# Altium schematic symbol library AnalogProject_Schm.SchLib: 8 symbols
Pins are listed as number, name and electrical type; pins without a type are passive.

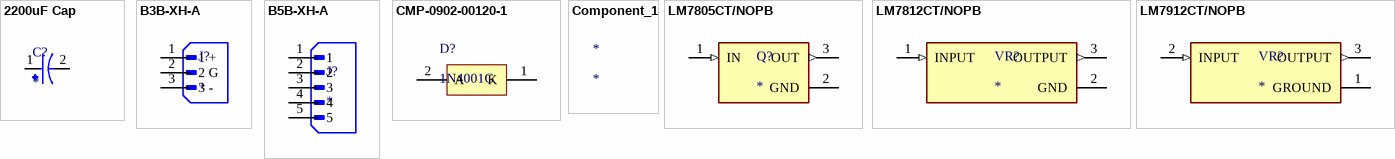
[diagram p0: symbols 2200uF Cap to LM7912CT/NOPB]

## 2200uF Cap
designator C?
2200 ÂµF 25 V Aluminum Electrolytic Capacitors Radial, Can - 5000 Hrs @ 105Â°C; MP: EEUFC1E222; MF: Panasonic; Check_prices: https://www.snapeda.com/parts/EEUFC1E222/Panasonic/view-part/?ref=eda; Availability: In Stock; Price: None; Package: RADIAL-2 Panasonic; Value: *; SnapEDA_Link: https://www.snapeda.com/parts/EEUFC1E222/Panasonic/view-part/?ref=snap
footprint 2200uF Cap
pins: 1 P, 2 N

## B3B-XH-A
designator J?, comment +
Connector Header Through Hole 3 position 0.098 (2.50mm); MF: JST Sales; MP: B3B-XH-A; SnapEDA_Link: https://www.snapeda.com/parts/B3B-XH-A/JST+Sales+America+Inc./view-part/?ref=snap; Package: None; Value: *; Check_prices: https://www.snapeda.com/parts/B3B-XH-A/JST+Sales+America+Inc./view-part/?ref=eda
footprint JST_B3B-XH-A
pins: 1 1 +, 2 2 G, 3 3 -

## B5B-XH-A
designator J?
Connector Header Through Hole 5 position 0.098 (2.50mm); MF: JST Sales; MP: B5B-XH-A; SnapEDA_Link: https://www.snapeda.com/parts/B5B-XH-A/JST+Sales+America+Inc./view-part/?ref=snap; Package: None; Value: *; Check_prices: https://www.snapeda.com/parts/B5B-XH-A/JST+Sales+America+Inc./view-part/?ref=eda
footprint JST_B5B-XH-A
pins: 1, 2, 3, 4, 5

## CMP-0902-00120-1
designator D?, comment 1N4001G
Diode, Rectifier, Standard, Vr 50V, If 1A, Pkg SOD57, Vf 0.93V, Tj +175C, Cs 30A, Ir 1UA; Manufacturer: On Semiconductor; Manufacturer Lifecycle Status: ACTIVE; Packing: Bulk Bag; IFSM Max (A): 30; Type: Standard Recovery; VRRM Max (V): 50; IO(rec) Max (A): 1; Element Configuration: Single; Forward Voltage: 1.1V; Peak Reverse Current: 10µA; RoHS: TRUE; DatasheetVersion: Rev. 13; ComponentLink2URL: http://www.onsemi.com/pub_link/Collateral/1N4001-D.PDF; PackageDescription: 2-Pin, Axial Lead, Diameter 2.35 mm; PackageReference: AXIAL_LEAD-2-59-10; ComponentLink3Description: Package Specification; ComponentLink2Description: Datasheet; ComponentLink1Description: Manufacturer URL; Mounting Technology: Through Hole; ComponentLink1URL: http://www.onsemi.com/; PartNumber: 1N4001G; PackageVersion: Rev. U, 02/2005; ComponentLink3URL: http://www.onsemi.cn/pub_link/Collateral/59-10.PDF; Supplier: DigiKey; Supplier Part Number: 1N4001GOS-ND; Manufacturer Part Number: 1N4001G; Category: Rectifier Diodes; Stock: 18819; Pricing: 1=0.17, 10=0.11, 100=0.0958, 500=0.0703, 1000=0.05028, 2000=0.04862, 5000=0.04638, 10000=0.04282, 50000=0.03549 (USD); Average Rectified Current: 1A; Breakdown Voltage: 50V; China RoHS: Non-Compliant; Contact Plating: Tin; Current Rating: 1A; Diameter: 2.7mm; Forward Current: 1A; Halogen Free: Halogen Free; Height: 5.2mm; Lead Free: Lead Free; Length: 5.1816mm; Lifecycle Status: Production; Max Forward Surge Current (Ifsm): 30A; Max Operating Temperature: 150°C; Max Output current: 1A; Max Repetitive Reverse Voltage (Vrrm): 50V; Max Reverse Voltage (DC): 50V; Max Surge Current: 30A; Min Operating Temperature: -65°C; Number of Elements: 1; Pins: 2; Number of Terminals: 2; Output Current: 1A; Packaging: Bulk; Peak Non-Repetitive Surge Current: 30A; Polarity: Standard; Radiation Hardening: No; REACH SVHC: No; Reverse Standoff Voltage: 50V; Reverse Voltage: 50V; Schedule B: 8541100080, 8541100080|8541100080, 8541100080|8541100080|8541100080, 8541100080|8541100080|8541100080|8541100080; Voltage Rating (DC): 50V; Weight: 4.535924g; Width: 6.35mm; ComponentLink4URL: https://datasheet.octopart.com:443/1N4001G-onsemi-datasheet-180957166.pdf?src-supplier=IHS; ComponentLink4Description: https://datasheet.octopart.com:443/1N4001G-onsemi-datasheet-180957166.pdf?src-supplier=IHS; ComponentLink5URL: https://datasheet.octopart.com:443/1N4001G-ON-Semiconductor-datasheet-12530915.pdf?src-supplier=TME; ComponentLink5Description: https://datasheet.octopart.com:443/1N4001G-ON-Semiconductor-datasheet-12530915.pdf?src-supplier=TME; ComponentLink6URL: https://datasheet.octopart.com:443/1N4001G-ON-Semiconductor-datasheet-642969.pdf?src-supplier=Newark; ComponentLink6Description: https://datasheet.octopart.com:443/1N4001G-ON-Semiconductor-datasheet-642969.pdf?src-supplier=Newark; ComponentLink7URL: https://datasheet.octopart.com:443/1N4001G-ON-Semiconductor-datasheet-120079161.pdf?src-supplier=Electro+Sonic; ComponentLink7Description: https://datasheet.octopart.com:443/1N4001G-ON-Semiconductor-datasheet-120079161.pdf?src-supplier=Electro+Sonic; ComponentLink8URL: https://datasheet.octopart.com:443/1N4001G-onsemi-datasheet-169408229.pdf?src-supplier=Farnell; ComponentLink8Description: https://datasheet.octopart.com:443/1N4001G-onsemi-datasheet-169408229.pdf?src-supplier=Farnell; ComponentLink9URL: https://datasheet.octopart.com:443/1N4001G-ON-Semiconductor-datasheet-7627526.pdf?src-supplier=Farnell; ComponentLink9Description: https://datasheet.octopart.com:443/1N4001G-ON-Semiconductor-datasheet-7627526.pdf?src-supplier=Farnell; ComponentLink10URL: https://datasheet.octopart.com:443/1N4001G-onsemi-datasheet-189127465.pdf?src-supplier=Master+Electronics; ComponentLink10Description: https://datasheet.octopart.com:443/1N4001G-onsemi-datasheet-189127465.pdf?src-supplier=Master+Electronics; ComponentLink11URL: https://datasheet.octopart.com:443/1N4001G-ON-Semiconductor-datasheet-9575991.pdf?src-supplier=RS+(Formerly+Allied+Electronics); ComponentLink11Description: https://datasheet.octopart.com:443/1N4001G-ON-Semiconductor-datasheet-9575991.pdf?src-supplier=RS+(Formerly+Allied+Electronics); ComponentLink12URL: https://datasheet.octopart.com:443/1N4001G-ON-Semiconductor-datasheet-14055278.pdf?src-supplier=iiiC; ComponentLink12Description: https://datasheet.octopart.com:443/1N4001G-ON-Semiconductor-datasheet-14055278.pdf?src-supplier=iiiC; ComponentLink13URL: http://sigma.octopart.com:80/15540786/rohs_certificate/ON-Semiconductor-1N4001G.pdf?src-supplier=Compliance+Statements; ComponentLink13Description: http://sigma.octopart.com:80/15540786/rohs_certificate/ON-Semiconductor-1N4001G.pdf?src-supplier=Compliance+Statements; ComponentLink14URL: http://sigma.octopart.com:80/15672877/materials_sheet/ON-Semiconductor-1N4001G.csv?src-supplier=Compliance+Statements; ComponentLink14Description: http://sigma.octopart.com:80/15672877/materials_sheet/ON-Semiconductor-1N4001G.csv?src-supplier=Compliance+Statements; ComponentLink15URL: http://sigma.octopart.com:80/150599183/rohs_statement/ON-Semiconductor-1N4001G.pdf?src-supplier=Compliance+Statements; ComponentLink15Description: http://sigma.octopart.com:80/150599183/rohs_statement/ON-Semiconductor-1N4001G.pdf?src-supplier=Compliance+Statements; ComponentLink16URL: http://sigma.octopart.com:80/reach_statement/ON-Semiconductor-company-79.pdf?src-supplier=Compliance+Statements; ComponentLink16Description: http://sigma.octopart.com:80/reach_statement/ON-Semiconductor-company-79.pdf?src-supplier=Compliance+Statements; ComponentLink17URL: http://sigma.octopart.com:80/reach_statement/Fairchild-Semiconductor-company-9.pdf?src-supplier=Compliance+Statements; ComponentLink17Description: http://sigma.octopart.com:80/reach_statement/Fairchild-Semiconductor-company-9.pdf?src-supplier=Compliance+Statements; ComponentLink18URL: http://sigma.octopart.com:80/rohs_statement/Fairchild-Semiconductor-company-10.pdf?src-supplier=Compliance+Statements; ComponentLink18Description: http://sigma.octopart.com:80/rohs_statement/Fairchild-Semiconductor-company-10.pdf?src-supplier=Compliance+Statements; ComponentLink19URL: http://sigma.octopart.com:80/rohs_statement/Fairchild-Semiconductor-company-11.pdf?src-supplier=Compliance+Statements; ComponentLink19Description: http://sigma.octopart.com:80/rohs_statement/Fairchild-Semiconductor-company-11.pdf?src-supplier=Compliance+Statements; ComponentLink20URL: https://octopart.com:443/opatz8j6/c1?t=Btc9yGr2Y6o3Pwa-u9IBNKBFOyXQsxSPzEp4tg1RnPN713PaLfwQ1VfuA_XWUtxZRoPEkwrRKtNU5uHmE9a_mhTqVQTtSywZFs8RaIGslnhFNPFr0p--yrxVyK_45oNWJt5JSFmwDU9d0CfUqhMTwTunA-l-EiNiIFdD3010omeyugU4VABW7IUkzIZBO9zKDN8M65PIbE-UaUrn33F7C4G05qz9fywyIsOWlUx2CANabjtnz7BcYWIZxYz_gNHThvESJfauwUU2t5ONFD2VpZoaqptG4I_ZAR9eGyvho77mnZZKzNh8uTO_hCoLFf0wHUbJxZDoQtu7_HsXZHzHAZZSUEaf&src-supplier=Compliance+Statements; ComponentLink20Description: https://octopart.com:443/opatz8j6/c1?t=Btc9yGr2Y6o3Pwa-u9IBNKBFOyXQsxSPzEp4tg1RnPN713PaLfwQ1VfuA_XWUtxZRoPEkwrRKtNU5uHmE9a_mhTqVQTtSywZFs8RaIGslnhFNPFr0p--yrxVyK_45oNWJt5JSFmwDU9d0CfUqhMTwTunA-l-EiNiIFdD3010omeyugU4VABW7IUkzIZBO9zKDN8M65PIbE-UaUrn33F7C4G05qz9fywyIsOWlUx2CANabjtnz7BcYWIZxYz_gNHThvESJfauwUU2t5ONFD2VpZoaqptG4I_ZAR9eGyvho77mnZZKzNh8uTO_hCoLFf0wHUbJxZDoQtu7_HsXZHzHAZZSUEaf&src-supplier=Compliance+Statements; ComponentLink21URL: https://octopart.com:443/opatz8j6/c1?t=ZzknCHRg1eQ0pBumD0smVZiDD7l0WIJxyB-GReAyKIHHXvCoGAl7N6KvvitfTZ_kS-BuwgVwGktFAqT5Etjfm8z2MrpD0Fv5hVeeNCfyR7K2vu65XlwxpbxnTacAWLjZtMJFE1XAOFuxxtViVIl_jxY3RjVJGecmGYptHNuJW5NI0GyIxNheSVEtQFEenhuBhf59cl8P4cyOuCw4Pf1ydSMw8_ZXmVQ88EklmMBxhbsjO7mxbuhQFU_aFJa2MGHq9Eu8gG2EezbstrSIdlyA2U2Z4qw-72lL76f98V4UigxNRMaaLpiadmiStbOc-D-VGSnr_fOP9dgx445bnGN4BWdDdQZTGA&src-supplier=Compliance+Statements; ComponentLink21Description: https://octopart.com:443/opatz8j6/c1?t=ZzknCHRg1eQ0pBumD0smVZiDD7l0WIJxyB-GReAyKIHHXvCoGAl7N6KvvitfTZ_kS-BuwgVwGktFAqT5Etjfm8z2MrpD0Fv5hVeeNCfyR7K2vu65XlwxpbxnTacAWLjZtMJFE1XAOFuxxtViVIl_jxY3RjVJGecmGYptHNuJW5NI0GyIxNheSVEtQFEenhuBhf59cl8P4cyOuCw4Pf1ydSMw8_ZXmVQ88EklmMBxhbsjO7mxbuhQFU_aFJa2MGHq9Eu8gG2EezbstrSIdlyA2U2Z4qw-72lL76f98V4UigxNRMaaLpiadmiStbOc-D-VGSnr_fOP9dgx445bnGN4BWdDdQZTGA&src-supplier=Compliance+Statements
footprint 1N4001_diode (AXIAL, 2-Leads, Diameter 2.35mm)
pins: 1 K, 2 A

## Component_1
designator *
Diode, Rectifier, Standard, Vr 50V, If 1A, Pkg SOD57, Vf 0.93V, Tj +175C, Cs 30A, Ir 1UA; Manufacturer: onsemi; Manufacturer Part Number: 1N4001G; Manufacturer Lifecycle Status: ACTIVE; Element Configuration: Single; Forward Voltage: 1.1V; Number of Elements: 1; Peak Reverse Current: 10µA; Supplier: DigiKey; Supplier Part Number: 1N4001GOS-ND; RoHS: Compliant; Category: Rectifier Diodes; Stock: 18819; Pricing: 1=0.17, 10=0.11, 100=0.0958, 500=0.0703, 1000=0.05028, 2000=0.04862, 5000=0.04638, 10000=0.04282, 50000=0.03549 (USD); Average Rectified Current: 1A; Breakdown Voltage: 50V; China RoHS: Non-Compliant; Contact Plating: Tin; Current Rating: 1A; Diameter: 2.7mm; Forward Current: 1A; Halogen Free: Halogen Free; Height: 5.2mm; Lead Free: Lead Free; Length: 5.1816mm; Lifecycle Status: Production; Max Forward Surge Current (Ifsm): 30A; Max Operating Temperature: 150°C; Max Output current: 1A; Max Repetitive Reverse Voltage (Vrrm): 50V; Max Reverse Voltage (DC): 50V; Max Surge Current: 30A; Min Operating Temperature: -65°C; Mounting Technology: Through Hole; Pins: 2; Number of Terminals: 2; Output Current: 1A; Packaging: Bulk; Peak Non-Repetitive Surge Current: 30A; Polarity: Standard; Radiation Hardening: No; REACH SVHC: No; Reverse Standoff Voltage: 50V; Reverse Voltage: 50V; Schedule B: 8541100080, 8541100080|8541100080, 8541100080|8541100080|8541100080, 8541100080|8541100080|8541100080|8541100080; Voltage Rating (DC): 50V; Weight: 4.535924g; Width: 6.35mm; ComponentLink1URL: https://datasheet.octopart.com:443/1N4001G-onsemi-datasheet-180957166.pdf?src-supplier=IHS; ComponentLink1Description: https://datasheet.octopart.com:443/1N4001G-onsemi-datasheet-180957166.pdf?src-supplier=IHS; ComponentLink2URL: https://datasheet.octopart.com:443/1N4001G-ON-Semiconductor-datasheet-12530915.pdf?src-supplier=TME; ComponentLink2Description: https://datasheet.octopart.com:443/1N4001G-ON-Semiconductor-datasheet-12530915.pdf?src-supplier=TME; ComponentLink3URL: https://datasheet.octopart.com:443/1N4001G-ON-Semiconductor-datasheet-642969.pdf?src-supplier=Newark; ComponentLink3Description: https://datasheet.octopart.com:443/1N4001G-ON-Semiconductor-datasheet-642969.pdf?src-supplier=Newark; ComponentLink4URL: https://datasheet.octopart.com:443/1N4001G-ON-Semiconductor-datasheet-120079161.pdf?src-supplier=Electro+Sonic; ComponentLink4Description: https://datasheet.octopart.com:443/1N4001G-ON-Semiconductor-datasheet-120079161.pdf?src-supplier=Electro+Sonic; ComponentLink5URL: https://datasheet.octopart.com:443/1N4001G-onsemi-datasheet-169408229.pdf?src-supplier=Farnell; ComponentLink5Description: https://datasheet.octopart.com:443/1N4001G-onsemi-datasheet-169408229.pdf?src-supplier=Farnell; ComponentLink6URL: https://datasheet.octopart.com:443/1N4001G-ON-Semiconductor-datasheet-7627526.pdf?src-supplier=Farnell; ComponentLink6Description: https://datasheet.octopart.com:443/1N4001G-ON-Semiconductor-datasheet-7627526.pdf?src-supplier=Farnell; ComponentLink7URL: https://datasheet.octopart.com:443/1N4001G-onsemi-datasheet-189127465.pdf?src-supplier=Master+Electronics; ComponentLink7Description: https://datasheet.octopart.com:443/1N4001G-onsemi-datasheet-189127465.pdf?src-supplier=Master+Electronics; ComponentLink8URL: https://datasheet.octopart.com:443/1N4001G-ON-Semiconductor-datasheet-9575991.pdf?src-supplier=RS+(Formerly+Allied+Electronics); ComponentLink8Description: https://datasheet.octopart.com:443/1N4001G-ON-Semiconductor-datasheet-9575991.pdf?src-supplier=RS+(Formerly+Allied+Electronics); ComponentLink9URL: https://datasheet.octopart.com:443/1N4001G-ON-Semiconductor-datasheet-14055278.pdf?src-supplier=iiiC; ComponentLink9Description: https://datasheet.octopart.com:443/1N4001G-ON-Semiconductor-datasheet-14055278.pdf?src-supplier=iiiC; ComponentLink10URL: http://sigma.octopart.com:80/15540786/rohs_certificate/ON-Semiconductor-1N4001G.pdf?src-supplier=Compliance+Statements; ComponentLink10Description: http://sigma.octopart.com:80/15540786/rohs_certificate/ON-Semiconductor-1N4001G.pdf?src-supplier=Compliance+Statements; ComponentLink11URL: http://sigma.octopart.com:80/15672877/materials_sheet/ON-Semiconductor-1N4001G.csv?src-supplier=Compliance+Statements; ComponentLink11Description: http://sigma.octopart.com:80/15672877/materials_sheet/ON-Semiconductor-1N4001G.csv?src-supplier=Compliance+Statements; ComponentLink12URL: http://sigma.octopart.com:80/150599183/rohs_statement/ON-Semiconductor-1N4001G.pdf?src-supplier=Compliance+Statements; ComponentLink12Description: http://sigma.octopart.com:80/150599183/rohs_statement/ON-Semiconductor-1N4001G.pdf?src-supplier=Compliance+Statements; ComponentLink13URL: http://sigma.octopart.com:80/reach_statement/ON-Semiconductor-company-79.pdf?src-supplier=Compliance+Statements; ComponentLink13Description: http://sigma.octopart.com:80/reach_statement/ON-Semiconductor-company-79.pdf?src-supplier=Compliance+Statements; ComponentLink14URL: http://sigma.octopart.com:80/reach_statement/Fairchild-Semiconductor-company-9.pdf?src-supplier=Compliance+Statements; ComponentLink14Description: http://sigma.octopart.com:80/reach_statement/Fairchild-Semiconductor-company-9.pdf?src-supplier=Compliance+Statements; ComponentLink15URL: http://sigma.octopart.com:80/rohs_statement/Fairchild-Semiconductor-company-10.pdf?src-supplier=Compliance+Statements; ComponentLink15Description: http://sigma.octopart.com:80/rohs_statement/Fairchild-Semiconductor-company-10.pdf?src-supplier=Compliance+Statements; ComponentLink16URL: http://sigma.octopart.com:80/rohs_statement/Fairchild-Semiconductor-company-11.pdf?src-supplier=Compliance+Statements; ComponentLink16Description: http://sigma.octopart.com:80/rohs_statement/Fairchild-Semiconductor-company-11.pdf?src-supplier=Compliance+Statements; ComponentLink17URL: https://octopart.com:443/opatz8j6/c1?t=Btc9yGr2Y6o3Pwa-u9IBNKBFOyXQsxSPzEp4tg1RnPN713PaLfwQ1VfuA_XWUtxZRoPEkwrRKtNU5uHmE9a_mhTqVQTtSywZFs8RaIGslnhFNPFr0p--yrxVyK_45oNWJt5JSFmwDU9d0CfUqhMTwTunA-l-EiNiIFdD3010omeyugU4VABW7IUkzIZBO9zKDN8M65PIbE-UaUrn33F7C4G05qz9fywyIsOWlUx2CANabjtnz7BcYWIZxYz_gNHThvESJfauwUU2t5ONFD2VpZoaqptG4I_ZAR9eGyvho77mnZZKzNh8uTO_hCoLFf0wHUbJxZDoQtu7_HsXZHzHAZZSUEaf&src-supplier=Compliance+Statements; ComponentLink17Description: https://octopart.com:443/opatz8j6/c1?t=Btc9yGr2Y6o3Pwa-u9IBNKBFOyXQsxSPzEp4tg1RnPN713PaLfwQ1VfuA_XWUtxZRoPEkwrRKtNU5uHmE9a_mhTqVQTtSywZFs8RaIGslnhFNPFr0p--yrxVyK_45oNWJt5JSFmwDU9d0CfUqhMTwTunA-l-EiNiIFdD3010omeyugU4VABW7IUkzIZBO9zKDN8M65PIbE-UaUrn33F7C4G05qz9fywyIsOWlUx2CANabjtnz7BcYWIZxYz_gNHThvESJfauwUU2t5ONFD2VpZoaqptG4I_ZAR9eGyvho77mnZZKzNh8uTO_hCoLFf0wHUbJxZDoQtu7_HsXZHzHAZZSUEaf&src-supplier=Compliance+Statements; ComponentLink18URL: https://octopart.com:443/opatz8j6/c1?t=ZzknCHRg1eQ0pBumD0smVZiDD7l0WIJxyB-GReAyKIHHXvCoGAl7N6KvvitfTZ_kS-BuwgVwGktFAqT5Etjfm8z2MrpD0Fv5hVeeNCfyR7K2vu65XlwxpbxnTacAWLjZtMJFE1XAOFuxxtViVIl_jxY3RjVJGecmGYptHNuJW5NI0GyIxNheSVEtQFEenhuBhf59cl8P4cyOuCw4Pf1ydSMw8_ZXmVQ88EklmMBxhbsjO7mxbuhQFU_aFJa2MGHq9Eu8gG2EezbstrSIdlyA2U2Z4qw-72lL76f98V4UigxNRMaaLpiadmiStbOc-D-VGSnr_fOP9dgx445bnGN4BWdDdQZTGA&src-supplier=Compliance+Statements; ComponentLink18Description: https://octopart.com:443/opatz8j6/c1?t=ZzknCHRg1eQ0pBumD0smVZiDD7l0WIJxyB-GReAyKIHHXvCoGAl7N6KvvitfTZ_kS-BuwgVwGktFAqT5Etjfm8z2MrpD0Fv5hVeeNCfyR7K2vu65XlwxpbxnTacAWLjZtMJFE1XAOFuxxtViVIl_jxY3RjVJGecmGYptHNuJW5NI0GyIxNheSVEtQFEenhuBhf59cl8P4cyOuCw4Pf1ydSMw8_ZXmVQ88EklmMBxhbsjO7mxbuhQFU_aFJa2MGHq9Eu8gG2EezbstrSIdlyA2U2Z4qw-72lL76f98V4UigxNRMaaLpiadmiStbOc-D-VGSnr_fOP9dgx445bnGN4BWdDdQZTGA&src-supplier=Compliance+Statements

## LM7805CT/NOPB
designator Q?
Linear Voltage Regulator IC Positive Fixed 1 Output 1.5A TO-220-3; MF: ON Semiconductor; MP: LM7805CT; Purchase-URL: https://pricing.snapeda.com/search/part/LM7805CT/?ref=eda; Check_prices: https://www.snapeda.com/parts/LM7805CT/Onsemi/view-part/?ref=eda; SnapEDA_Link: https://www.snapeda.com/parts/LM7805CT/Onsemi/view-part/?ref=snap; Price: None; Availability: In Stock; Package: TO-220-3 ON Semiconductor; Value: *
footprint LM7805
pins: 1 IN (in), 2 GND (power), 3 OUT (out)

## LM7812CT/NOPB
designator VR?
1.5-A, 30-V, linear voltage regulator; MF: Texas Instruments; MP: LM7812CT/NOPB; SnapEDA_Link: https://www.snapeda.com/parts/LM7812CT/NOPB/Texas+Instruments/view-part/?ref=snap; Package: TO-220-3 Texas Instruments; Value: *; Check_prices: https://www.snapeda.com/parts/LM7812CT/NOPB/Texas+Instruments/view-part/?ref=eda
footprint LM7812
pins: 1 INPUT (in), 2 GND (power), 3 OUTPUT (out)

## LM7912CT/NOPB
designator VR?
1.5-A, negative linear voltage regulator; MF: Texas Instruments; MP: LM7912CT/NOPB; SnapEDA_Link: https://www.snapeda.com/parts/LM7912CT/NOPB/Texas+Instruments/view-part/?ref=snap; Package: TO-220-3 Texas Instruments; Value: *; Check_prices: https://www.snapeda.com/parts/LM7912CT/NOPB/Texas+Instruments/view-part/?ref=eda
footprint LM7912
pins: 1 GROUND (power), 2 INPUT (in), 3 OUTPUT (out)